# Altium footprint library WR-TBL_Pluggable Connector_5.08mm.PcbLib: 295 footprints (part 4 of 19)
Each footprint in its own frame and in the unit in brackets; x right, y up, seen from the top. Pads: shape width x height; smd on the part's side, far side on the other; paste and mask are expansions set on the pad; w line width, h text height; cw(c..) or ccw(c..) is an arc to the next point about the centre after c.
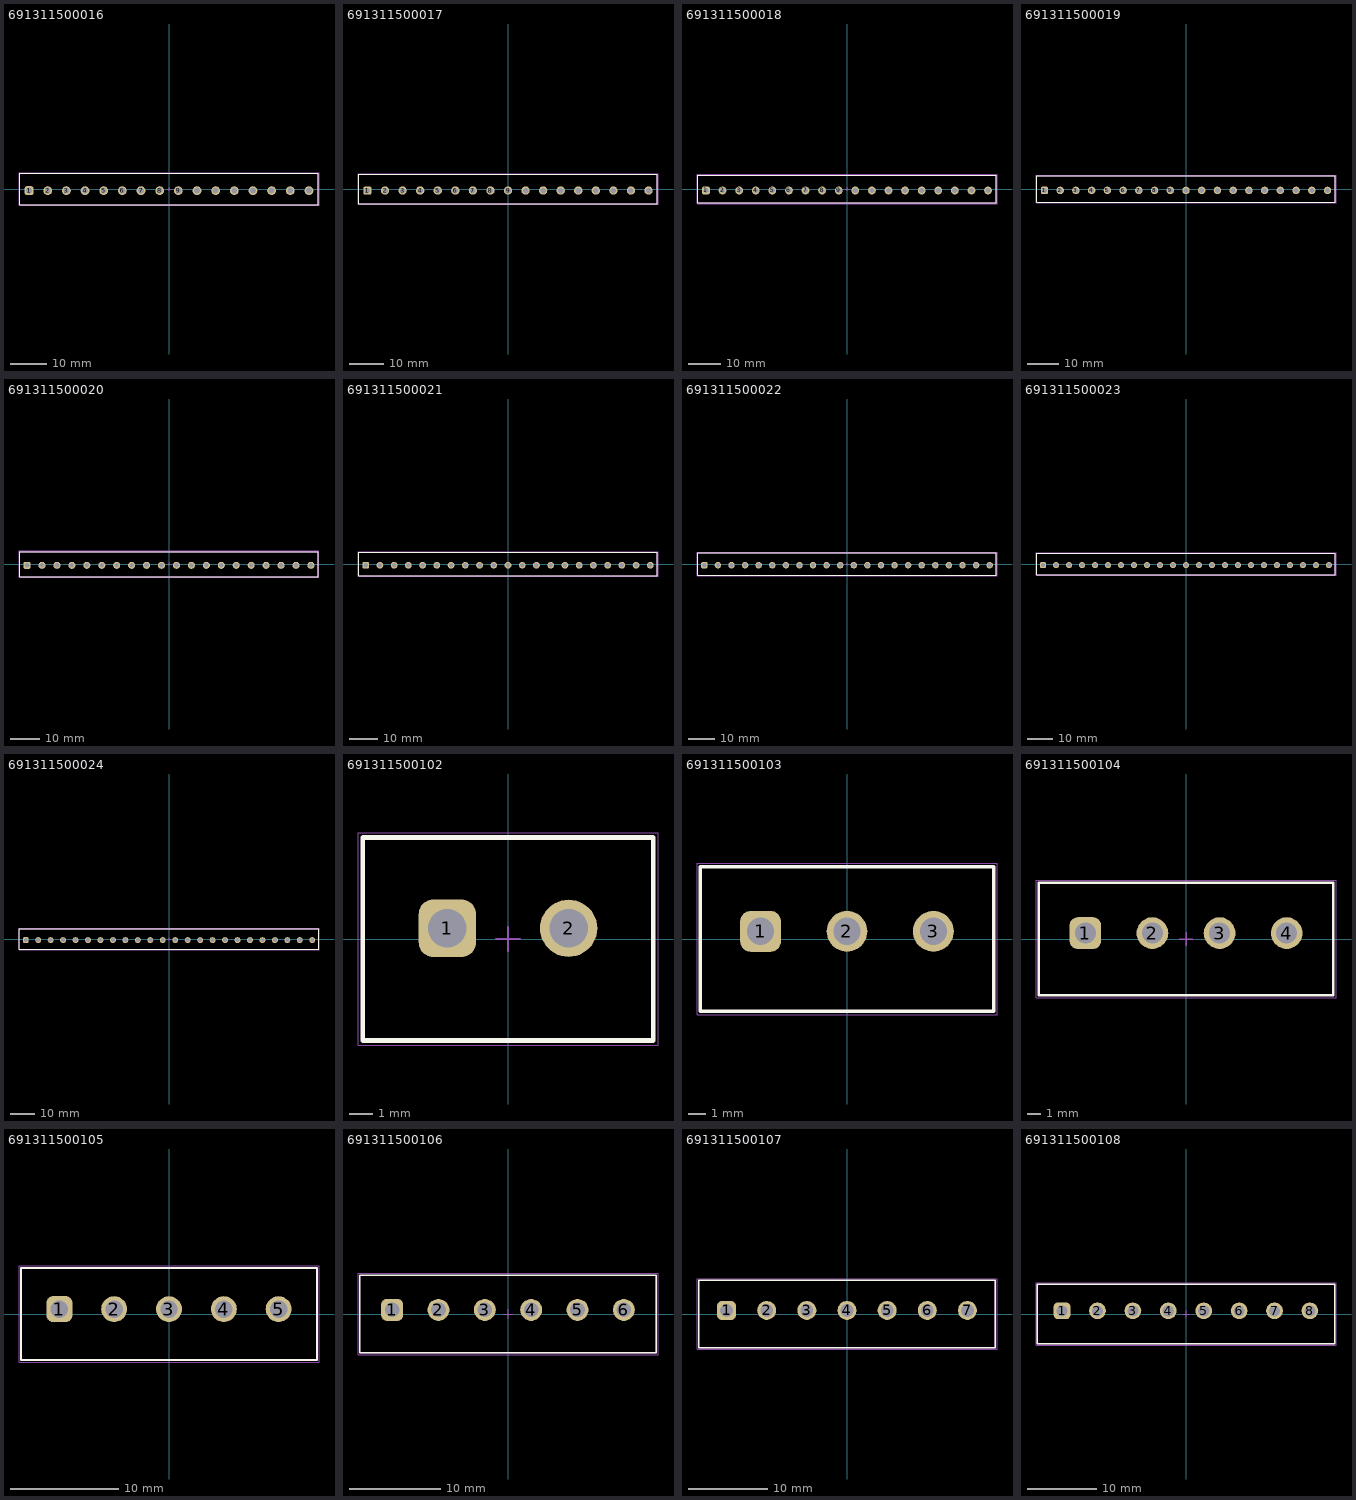
[diagram p3: the footprints below, top view; thin cyan lines are the x and y axes]

## 691311500016 [mm] "5,08mm - PCB Headers - Vertical - Opened ends -16p"
height 12
pads (16):
  rrect50% 2.4x2.4 hole 1.6: 1(-38.1,-0.45)
  round 2.4 hole 1.6: 2(-33.02,-0.45) 3(-27.94,-0.45) 4(-22.86,-0.45) 5(-17.78,-0.45) 6(-12.7,-0.45) 7(-7.62,-0.45) 8(-2.54,-0.45) 9(2.54,-0.45) 10(7.62,-0.45) 11(12.7,-0.45) 12(17.78,-0.45) 13(22.86,-0.45) 14(27.94,-0.45) 15(33.02,-0.45) 16(38.1,-0.45)
Top Overlay:
  lines w0.2: -40.64,-4.25 -40.64,4.25 40.64,4.25 40.64,-4.25 -40.64,-4.25
Top Assembly:
  lines w0.1: -40.64,-4.25 40.64,-4.25 40.64,4.25 -40.64,4.25 -40.64,-4.25
Top Designator:
  text ".Designator" at -3.647,-0.357 h1
Top 3D Body:
  lines w0.1: -40.64,-4.25 -40.64,4.25 40.64,4.25 40.64,-4.25 -40.64,-4.25
Top Courtyard:
  lines w0.05: -40.84,-4.45 -40.84,4.45 40.84,4.45 40.84,-4.45 -40.84,-4.45
Top Component Center:
  lines w0.1: -0.5,0 0.5,0 ; 0,-0.5 0,0.5
3D body "691311500016.stp": height 12.05, standoff -3.95, extent -40.64,-4.25 40.64,4.25

## 691311500017 [mm] "5,08mm - PCB Headers - Vertical - Opened ends -17p"
height 12
pads (17):
  rrect50% 2.4x2.4 hole 1.6: 1(-40.64,-0.45)
  round 2.4 hole 1.6: 2(-35.56,-0.45) 3(-30.48,-0.45) 4(-25.4,-0.45) 5(-20.32,-0.45) 6(-15.24,-0.45) 7(-10.16,-0.45) 8(-5.08,-0.45) 9(0,-0.45) 10(5.08,-0.45) 11(10.16,-0.45) 12(15.24,-0.45) 13(20.32,-0.45) 14(25.4,-0.45) 15(30.48,-0.45) 16(35.56,-0.45) 17(40.64,-0.45)
Top Overlay:
  lines w0.2: -43.18,-4.25 43.18,-4.25 43.18,4.25 -43.18,4.25 -43.18,-4.25
Top Assembly:
  lines w0.1: -43.18,-4.25 -43.18,4.25 43.18,4.25 43.18,-4.25 -43.18,-4.25
Top Designator:
  text ".Designator" at -3.647,-0.357 h1
Top 3D Body:
  lines w0.1: -43.18,-4.25 43.18,-4.25 43.18,4.25 -43.18,4.25 -43.18,-4.25
Top Courtyard:
  lines w0.05: -43.38,-4.45 43.38,-4.45 43.38,4.45 -43.38,4.45 -43.38,-4.45
Top Component Center:
  lines w0.1: -0.5,0 0.5,0 ; 0,-0.5 0,0.5
3D body "691311500017.stp": height 12.05, standoff -3.95, extent -43.18,-4.25 43.18,4.25

## 691311500018 [mm] "5,08mm - PCB Headers - Vertical - Opened ends -18p"
height 12
pads (18):
  rrect50% 2.4x2.4 hole 1.6: 1(-43.18,-0.45)
  round 2.4 hole 1.6: 2(-38.1,-0.45) 3(-33.02,-0.45) 4(-27.94,-0.45) 5(-22.86,-0.45) 6(-17.78,-0.45) 7(-12.7,-0.45) 8(-7.62,-0.45) 9(-2.54,-0.45) 10(2.54,-0.45) 11(7.62,-0.45) 12(12.7,-0.45) 13(17.78,-0.45) 14(22.86,-0.45) 15(27.94,-0.45) 16(33.02,-0.45) 17(38.1,-0.45) 18(43.18,-0.45)
Top Overlay:
  lines w0.2: -45.72,-4.25 -45.72,4.25 45.72,4.25 45.72,-4.25 -45.72,-4.25
Top Assembly:
  lines w0.1: -45.72,-4.25 45.72,-4.25 45.72,4.25 -45.72,4.25 -45.72,-4.25
Top Designator:
  text ".Designator" at -3.647,-0.357 h1
Top 3D Body:
  lines w0.1: -45.72,-4.25 -45.72,4.25 45.72,4.25 45.72,-4.25 -45.72,-4.25
Top Courtyard:
  lines w0.05: -45.92,-4.45 -45.92,4.45 45.92,4.45 45.92,-4.45 -45.92,-4.45
Top Component Center:
  lines w0.1: -0.5,0 0.5,0 ; 0,-0.5 0,0.5
3D body "691311500018.stp": height 12.05, standoff -3.95, extent -45.72,-4.25 45.72,4.25

## 691311500019 [mm] "5,08mm - PCB Headers - Vertical - Opened ends -19p"
height 12
pads (19):
  rrect50% 2.4x2.4 hole 1.6: 1(-45.72,-0.45)
  round 2.4 hole 1.6: 2(-40.64,-0.45) 3(-35.56,-0.45) 4(-30.48,-0.45) 5(-25.4,-0.45) 6(-20.32,-0.45) 7(-15.24,-0.45) 8(-10.16,-0.45) 9(-5.08,-0.45) 10(0,-0.45) 11(5.08,-0.45) 12(10.16,-0.45) 13(15.24,-0.45) 14(20.32,-0.45) 15(25.4,-0.45) 16(30.48,-0.45) 17(35.56,-0.45) 18(40.64,-0.45) 19(45.72,-0.45)
Top Overlay:
  lines w0.2: -48.26,-4.25 48.26,-4.25 48.26,4.25 -48.26,4.25 -48.26,-4.25
Top Assembly:
  lines w0.1: -48.26,-4.25 -48.26,4.25 48.26,4.25 48.26,-4.25 -48.26,-4.25
Top Designator:
  text ".Designator" at -3.647,-0.357 h1
Top 3D Body:
  lines w0.1: -48.26,-4.25 48.26,-4.25 48.26,4.25 -48.26,4.25 -48.26,-4.25
Top Courtyard:
  lines w0.05: -48.46,-4.45 48.46,-4.45 48.46,4.45 -48.46,4.45 -48.46,-4.45
Top Component Center:
  lines w0.1: -0.5,0 0.5,0 ; 0,-0.5 0,0.5
3D body "691311500019.stp": height 12.05, standoff -3.95, extent -48.26,-4.25 48.26,4.25

## 691311500020 [mm] "5,08mm - PCB Headers - Vertical - Opened ends -20p"
height 12
pads (20):
  rrect50% 2.4x2.4 hole 1.6: 1(-48.26,-0.45)
  round 2.4 hole 1.6: 2(-43.18,-0.45) 3(-38.1,-0.45) 4(-33.02,-0.45) 5(-27.94,-0.45) 6(-22.86,-0.45) 7(-17.78,-0.45) 8(-12.7,-0.45) 9(-7.62,-0.45) 10(-2.54,-0.45) 11(2.54,-0.45) 12(7.62,-0.45) 13(12.7,-0.45) 14(17.78,-0.45) 15(22.86,-0.45) 16(27.94,-0.45) 17(33.02,-0.45) 18(38.1,-0.45) 19(43.18,-0.45) 20(48.26,-0.45)
Top Overlay:
  lines w0.2: -50.8,-4.25 50.8,-4.25 50.8,4.25 -50.8,4.25 -50.8,-4.25
Top Assembly:
  lines w0.1: -50.8,-4.25 -50.8,4.25 50.8,4.25 50.8,-4.25 -50.8,-4.25
Top Designator:
  text ".Designator" at -3.647,-0.357 h1
Top 3D Body:
  lines w0.1: -50.8,-4.25 50.8,-4.25 50.8,4.25 -50.8,4.25 -50.8,-4.25
Top Courtyard:
  lines w0.05: -51,-4.45 51,-4.45 51,4.45 -51,4.45 -51,-4.45
Top Component Center:
  lines w0.1: -0.5,0 0.5,0 ; 0,-0.5 0,0.5
3D body "691311500020.stp": height 12.05, standoff -3.95, extent -50.8,-4.25 50.8,4.25

## 691311500021 [mm] "5,08mm - PCB Headers - Vertical - Opened ends -21p"
height 12
pads (21):
  rrect50% 2.4x2.4 hole 1.6: 1(-50.8,-0.45)
  round 2.4 hole 1.6: 2(-45.72,-0.45) 3(-40.64,-0.45) 4(-35.56,-0.45) 5(-30.48,-0.45) 6(-25.4,-0.45) 7(-20.32,-0.45) 8(-15.24,-0.45) 9(-10.16,-0.45) 10(-5.08,-0.45) 11(0,-0.45) 12(5.08,-0.45) 13(10.16,-0.45) 14(15.24,-0.45) 15(20.32,-0.45) 16(25.4,-0.45) 17(30.48,-0.45) 18(35.56,-0.45) 19(40.64,-0.45) 20(45.72,-0.45) 21(50.8,-0.45)
Top Overlay:
  lines w0.2: -53.34,-4.25 53.34,-4.25 53.34,4.25 -53.34,4.25 -53.34,-4.25
Top Assembly:
  lines w0.1: -53.34,-4.25 -53.34,4.25 53.34,4.25 53.34,-4.25 -53.34,-4.25
Top Designator:
  text ".Designator" at -3.647,-0.357 h1
Top 3D Body:
  lines w0.1: -53.34,-4.25 53.34,-4.25 53.34,4.25 -53.34,4.25 -53.34,-4.25
Top Courtyard:
  lines w0.05: -53.54,-4.45 53.54,-4.45 53.54,4.45 -53.54,4.45 -53.54,-4.45
Top Component Center:
  lines w0.1: -0.5,0 0.5,0 ; 0,-0.5 0,0.5
3D body "691311500021.stp": height 12.05, standoff -3.95, extent -53.34,-4.25 53.34,4.25

## 691311500022 [mm] "5,08mm - PCB Headers - Vertical - Opened ends -22p"
height 12
pads (22):
  rrect50% 2.4x2.4 hole 1.6: 1(-53.34,-0.45)
  round 2.4 hole 1.6: 2(-48.26,-0.45) 3(-43.18,-0.45) 4(-38.1,-0.45) 5(-33.02,-0.45) 6(-27.94,-0.45) 7(-22.86,-0.45) 8(-17.78,-0.45) 9(-12.7,-0.45) 10(-7.62,-0.45) 11(-2.54,-0.45) 12(2.54,-0.45) 13(7.62,-0.45) 14(12.7,-0.45) 15(17.78,-0.45) 16(22.86,-0.45) 17(27.94,-0.45) 18(33.02,-0.45) 19(38.1,-0.45) 20(43.18,-0.45) 21(48.26,-0.45) 22(53.34,-0.45)
Top Overlay:
  lines w0.2: -55.88,-4.25 -55.88,4.25 55.88,4.25 55.88,-4.25 -55.88,-4.25
Top Assembly:
  lines w0.1: -55.88,-4.25 55.88,-4.25 55.88,4.25 -55.88,4.25 -55.88,-4.25
Top Designator:
  text ".Designator" at -3.647,-0.357 h1
Top 3D Body:
  lines w0.1: -55.88,-4.25 -55.88,4.25 55.88,4.25 55.88,-4.25 -55.88,-4.25
Top Courtyard:
  lines w0.05: -56.08,-4.45 -56.08,4.45 56.08,4.45 56.08,-4.45 -56.08,-4.45
Top Component Center:
  lines w0.1: -0.5,0 0.5,0 ; 0,-0.5 0,0.5
3D body "691311500022.stp": height 12.05, standoff -3.95, extent -55.88,-4.25 55.88,4.25

## 691311500023 [mm] "5,08mm - PCB Headers - Vertical - Opened ends -23p"
height 12
pads (23):
  rrect50% 2.4x2.4 hole 1.6: 1(-55.88,-0.45)
  round 2.4 hole 1.6: 2(-50.8,-0.45) 3(-45.72,-0.45) 4(-40.64,-0.45) 5(-35.56,-0.45) 6(-30.48,-0.45) 7(-25.4,-0.45) 8(-20.32,-0.45) 9(-15.24,-0.45) 10(-10.16,-0.45) 11(-5.08,-0.45) 12(0,-0.45) 13(5.08,-0.45) 14(10.16,-0.45) 15(15.24,-0.45) 16(20.32,-0.45) 17(25.4,-0.45) 18(30.48,-0.45) 19(35.56,-0.45) 20(40.64,-0.45) 21(45.72,-0.45) 22(50.8,-0.45) 23(55.88,-0.45)
Top Overlay:
  lines w0.2: -58.42,-4.25 -58.42,4.25 58.42,4.25 58.42,-4.25 -58.42,-4.25
Top Assembly:
  lines w0.1: -58.42,-4.25 58.42,-4.25 58.42,4.25 -58.42,4.25 -58.42,-4.25
Top Designator:
  text ".Designator" at -3.647,-0.357 h1
Top 3D Body:
  lines w0.1: -58.42,-4.25 -58.42,4.25 58.42,4.25 58.42,-4.25 -58.42,-4.25
Top Courtyard:
  lines w0.05: -58.62,-4.45 -58.62,4.45 58.62,4.45 58.62,-4.45 -58.62,-4.45
Top Component Center:
  lines w0.1: -0.5,0 0.5,0 ; 0,-0.5 0,0.5
3D body "691311500023.stp": height 12.05, standoff -3.95, extent -58.42,-4.25 58.42,4.25

## 691311500024 [mm] "5,08mm - PCB Headers - Vertical - Opened ends -24p"
height 12
pads (24):
  rrect50% 2.4x2.4 hole 1.6: 1(-58.42,-0.45)
  round 2.4 hole 1.6: 2(-53.34,-0.45) 3(-48.26,-0.45) 4(-43.18,-0.45) 5(-38.1,-0.45) 6(-33.02,-0.45) 7(-27.94,-0.45) 8(-22.86,-0.45) 9(-17.78,-0.45) 10(-12.7,-0.45) 11(-7.62,-0.45) 12(-2.54,-0.45) 13(2.54,-0.45) 14(7.62,-0.45) 15(12.7,-0.45) 16(17.78,-0.45) 17(22.86,-0.45) 18(27.94,-0.45) 19(33.02,-0.45) 20(38.1,-0.45) 21(43.18,-0.45) 22(48.26,-0.45) 23(53.34,-0.45) 24(58.42,-0.45)
Top Overlay:
  lines w0.2: -60.96,-4.25 60.96,-4.25 60.96,4.25 -60.96,4.25 -60.96,-4.25
Top Assembly:
  lines w0.1: -60.96,-4.25 -60.96,4.25 60.96,4.25 60.96,-4.25 -60.96,-4.25
Top Designator:
  text ".Designator" at -3.647,-0.357 h1
Top 3D Body:
  lines w0.1: -60.96,-4.25 60.96,-4.25 60.96,4.25 -60.96,4.25 -60.96,-4.25
Top Courtyard:
  lines w0.05: -61.16,-4.45 61.16,-4.45 61.16,4.45 -61.16,4.45 -61.16,-4.45
Top Component Center:
  lines w0.1: -0.5,0 0.5,0 ; 0,-0.5 0,0.5
3D body "691311500024.stp": height 12.05, standoff -3.95, extent -60.96,-4.25 60.96,4.25

## 691311500102 [mm] "5,08mm - PCB Headers - Vertical - Closed ends -02p"
height 12
pads (2):
  rrect50% 2.4x2.4 hole 1.6: 1(-2.54,0.45)
  round 2.4 hole 1.6: 2(2.54,0.45)
Top Overlay:
  lines w0.2: -6.08,-4.25 6.08,-4.25 6.08,4.25 -6.08,4.25 -6.08,-4.25
Top Assembly:
  lines w0.1: -6.08,-4.25 -6.08,4.25 6.08,4.25 6.08,-4.25 -6.08,-4.25
Top Designator:
  text ".Designator" at -3.647,-0.357 h1
Top 3D Body:
  lines w0.1: -6.08,-4.25 6.08,-4.25 6.08,4.25 -6.08,4.25 -6.08,-4.25
Top Courtyard:
  lines w0.05: -6.28,-4.45 6.28,-4.45 6.28,4.45 -6.28,4.45 -6.28,-4.45
Top Component Center:
  lines w0.1: -0.5,0 0.5,0 ; 0,-0.5 0,0.5
3D body "691311500102.stp": height 12.05, standoff -3.95, extent -6.08,-4.25 6.08,4.25

## 691311500103 [mm] "5,08mm - PCB Headers - Vertical - Closed ends -03p"
height 12
pads (3):
  rrect50% 2.4x2.4 hole 1.6: 1(-5.08,0.45)
  round 2.4 hole 1.6: 2(0,0.45) 3(5.08,0.45)
Top Overlay:
  lines w0.2: -8.62,-4.25 8.62,-4.25 8.62,4.25 -8.62,4.25 -8.62,-4.25
Top Assembly:
  lines w0.1: -8.62,-4.25 -8.62,4.25 8.62,4.25 8.62,-4.25 -8.62,-4.25
Top Designator:
  text ".Designator" at -3.647,-0.357 h1
Top 3D Body:
  lines w0.1: -8.62,-4.25 8.62,-4.25 8.62,4.25 -8.62,4.25 -8.62,-4.25
Top Courtyard:
  lines w0.05: -8.82,-4.45 8.82,-4.45 8.82,4.45 -8.82,4.45 -8.82,-4.45
Top Component Center:
  lines w0.1: -0.5,0 0.5,0 ; 0,-0.5 0,0.5
3D body "691311500103.stp": height 12.05, standoff -3.95, extent -8.62,-4.25 8.62,4.25

## 691311500104 [mm] "5,08mm - PCB Headers - Vertical - Closed ends -04p"
height 12
pads (4):
  rrect50% 2.4x2.4 hole 1.6: 1(-7.62,0.45)
  round 2.4 hole 1.6: 2(-2.54,0.45) 3(2.54,0.45) 4(7.62,0.45)
Top Overlay:
  lines w0.2: -11.16,-4.25 11.16,-4.25 11.16,4.25 -11.16,4.25 -11.16,-4.25
Top Assembly:
  lines w0.1: -11.16,-4.25 -11.16,4.25 11.16,4.25 11.16,-4.25 -11.16,-4.25
Top Designator:
  text ".Designator" at -3.647,-0.357 h1
Top 3D Body:
  lines w0.1: -11.16,-4.25 11.16,-4.25 11.16,4.25 -11.16,4.25 -11.16,-4.25
Top Courtyard:
  lines w0.05: -11.36,-4.45 11.36,-4.45 11.36,4.45 -11.36,4.45 -11.36,-4.45
Top Component Center:
  lines w0.1: -0.5,0 0.5,0 ; 0,-0.5 0,0.5
3D body "691311500104.stp": height 12.05, standoff -3.95, extent -11.16,-4.25 11.16,4.25

## 691311500105 [mm] "5,08mm - PCB Headers - Vertical - Closed ends -05p"
height 12
pads (5):
  rrect50% 2.4x2.4 hole 1.6: 1(-10.16,0.45)
  round 2.4 hole 1.6: 2(-5.08,0.45) 3(0,0.45) 4(5.08,0.45) 5(10.16,0.45)
Top Overlay:
  lines w0.2: -13.7,-4.25 -13.7,4.25 13.7,4.25 13.7,-4.25 -13.7,-4.25
Top Assembly:
  lines w0.1: -13.7,-4.25 13.7,-4.25 13.7,4.25 -13.7,4.25 -13.7,-4.25
Top Designator:
  text ".Designator" at -3.647,-0.357 h1
Top 3D Body:
  lines w0.1: -13.7,-4.25 -13.7,4.25 13.7,4.25 13.7,-4.25 -13.7,-4.25
Top Courtyard:
  lines w0.05: -13.9,-4.45 -13.9,4.45 13.9,4.45 13.9,-4.45 -13.9,-4.45
Top Component Center:
  lines w0.1: -0.5,0 0.5,0 ; 0,-0.5 0,0.5
3D body "691311500105.stp": height 12.05, standoff -3.95, extent -13.7,-4.25 13.7,4.25

## 691311500106 [mm] "5,08mm - PCB Headers - Vertical - Closed ends -06p"
height 12
pads (6):
  rrect50% 2.4x2.4 hole 1.6: 1(-12.7,0.45)
  round 2.4 hole 1.6: 2(-7.62,0.45) 3(-2.54,0.45) 4(2.54,0.45) 5(7.62,0.45) 6(12.7,0.45)
Top Overlay:
  lines w0.2: -16.24,-4.25 16.24,-4.25 16.24,4.25 -16.24,4.25 -16.24,-4.25
Top Assembly:
  lines w0.1: -16.24,-4.25 -16.24,4.25 16.24,4.25 16.24,-4.25 -16.24,-4.25
Top Designator:
  text ".Designator" at -3.647,-0.357 h1
Top 3D Body:
  lines w0.1: -16.24,-4.25 16.24,-4.25 16.24,4.25 -16.24,4.25 -16.24,-4.25
Top Courtyard:
  lines w0.05: -16.44,-4.45 16.44,-4.45 16.44,4.45 -16.44,4.45 -16.44,-4.45
Top Component Center:
  lines w0.1: -0.5,0 0.5,0 ; 0,-0.5 0,0.5
3D body "691311500106.stp": height 12.05, standoff -3.95, extent -16.24,-4.25 16.24,4.25

## 691311500107 [mm] "5,08mm - PCB Headers - Vertical - Closed ends -07p"
height 12
pads (7):
  rrect50% 2.4x2.4 hole 1.6: 1(-15.24,0.45)
  round 2.4 hole 1.6: 2(-10.16,0.45) 3(-5.08,0.45) 4(0,0.45) 5(5.08,0.45) 6(10.16,0.45) 7(15.24,0.45)
Top Overlay:
  lines w0.2: -18.78,-4.25 18.78,-4.25 18.78,4.25 -18.78,4.25 -18.78,-4.25
Top Assembly:
  lines w0.1: -18.78,-4.25 -18.78,4.25 18.78,4.25 18.78,-4.25 -18.78,-4.25
Top Designator:
  text ".Designator" at -3.647,-0.357 h1
Top 3D Body:
  lines w0.1: -18.78,-4.25 18.78,-4.25 18.78,4.25 -18.78,4.25 -18.78,-4.25
Top Courtyard:
  lines w0.05: -18.98,-4.45 18.98,-4.45 18.98,4.45 -18.98,4.45 -18.98,-4.45
Top Component Center:
  lines w0.1: -0.5,0 0.5,0 ; 0,-0.5 0,0.5
3D body "691311500107.stp": height 12.05, standoff -3.95, extent -18.78,-4.25 18.78,4.25

## 691311500108 [mm] "5,08mm - PCB Headers - Vertical - Closed ends -08p"
height 12
pads (8):
  rrect50% 2.4x2.4 hole 1.6: 1(-17.78,0.45)
  round 2.4 hole 1.6: 2(-12.7,0.45) 3(-7.62,0.45) 4(-2.54,0.45) 5(2.54,0.45) 6(7.62,0.45) 7(12.7,0.45) 8(17.78,0.45)
Top Overlay:
  lines w0.2: -21.32,-4.25 21.32,-4.25 21.32,4.25 -21.32,4.25 -21.32,-4.25
Top Assembly:
  lines w0.1: -21.32,-4.25 -21.32,4.25 21.32,4.25 21.32,-4.25 -21.32,-4.25
Top Designator:
  text ".Designator" at -3.647,-0.357 h1
Top 3D Body:
  lines w0.1: -21.32,-4.25 21.32,-4.25 21.32,4.25 -21.32,4.25 -21.32,-4.25
Top Courtyard:
  lines w0.05: -21.52,-4.45 21.52,-4.45 21.52,4.45 -21.52,4.45 -21.52,-4.45
Top Component Center:
  lines w0.1: -0.5,0 0.5,0 ; 0,-0.5 0,0.5
3D body "691311500108.stp": height 12.05, standoff -3.95, extent -21.32,-4.25 21.32,4.25